# Altium schematic symbol library resistor.SchLib: 5 symbols
Pins are listed as number, name and electrical type; pins without a type are passive.

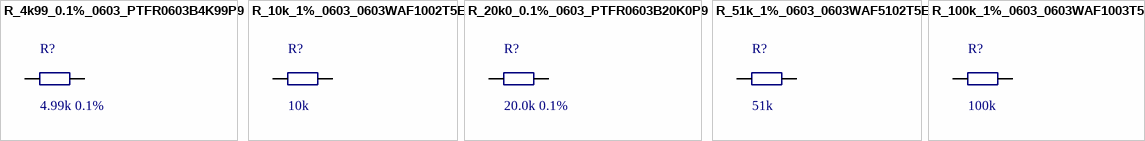
[diagram p0: symbols R_4k99_0.1%_0603_PTFR0603B4K99P9 to R_100k_1%_0603_0603WAF1003T5E]

## R_4k99_0.1%_0603_PTFR0603B4K99P9
designator R?, comment 4.99k 0.1%
RFBB: 4.99 kOhm 0.1% 25ppm 100mW 0603 thin film; Manufacturer: RESI; MPN: PTFR0603B4K99P9; Value: 4.99k 0.1%; LCSC: C5382597; JLCPCB Type: Extended; Datasheet: PTFR0603B4K99P9_C5382597.pdf
footprint RESC1608_0603
pins: 1, 2

## R_10k_1%_0603_0603WAF1002T5E
designator R?, comment 10k
10 kOhm 1% 100mW 0603 (RENB, MOSFET gate); Manufacturer: UNI-ROYAL; MPN: 0603WAF1002T5E; Value: 10k; LCSC: C25804; JLCPCB Type: Basic; Datasheet: 0603WAF1002T5E_C25804.pdf
footprint RESC1608_0603
pins: 1, 2

## R_20k0_0.1%_0603_PTFR0603B20K0P9
designator R?, comment 20.0k 0.1%
RFBT: 20.0 kOhm 0.1% 25ppm 100mW 0603 thin film; Manufacturer: RESI; MPN: PTFR0603B20K0P9; Value: 20.0k 0.1%; LCSC: C328424; JLCPCB Type: Extended; Datasheet: PTFR0603B20K0P9_C328424.pdf
footprint RESC1608_0603
pins: 1, 2

## R_51k_1%_0603_0603WAF5102T5E
designator R?, comment 51k
RENT: 51 kOhm 1% 100mW 0603; Manufacturer: UNI-ROYAL; MPN: 0603WAF5102T5E; Value: 51k; LCSC: C23196; JLCPCB Type: Basic; Datasheet: 0603WAF5102T5E_C23196.pdf
footprint RESC1608_0603
pins: 1, 2

## R_100k_1%_0603_0603WAF1003T5E
designator R?, comment 100k
PG pull-up 100 kOhm 1% 0603; Manufacturer: UNI-ROYAL; MPN: 0603WAF1003T5E; Value: 100k; LCSC: C25803; JLCPCB Type: Basic; Datasheet: 0603WAF1003T5E_C25803.pdf
footprint RESC1608_0603
pins: 1, 2